# Altium footprint library FootPrintLib_3.PcbLib: 198 footprints (part 4 of 13)
Each footprint in its own frame and in the unit in brackets; x right, y up, seen from the top. Pads: shape width x height; smd on the part's side, far side on the other; paste and mask are expansions set on the pad; w line width, h text height; cw(c..) or ccw(c..) is an arc to the next point about the centre after c.
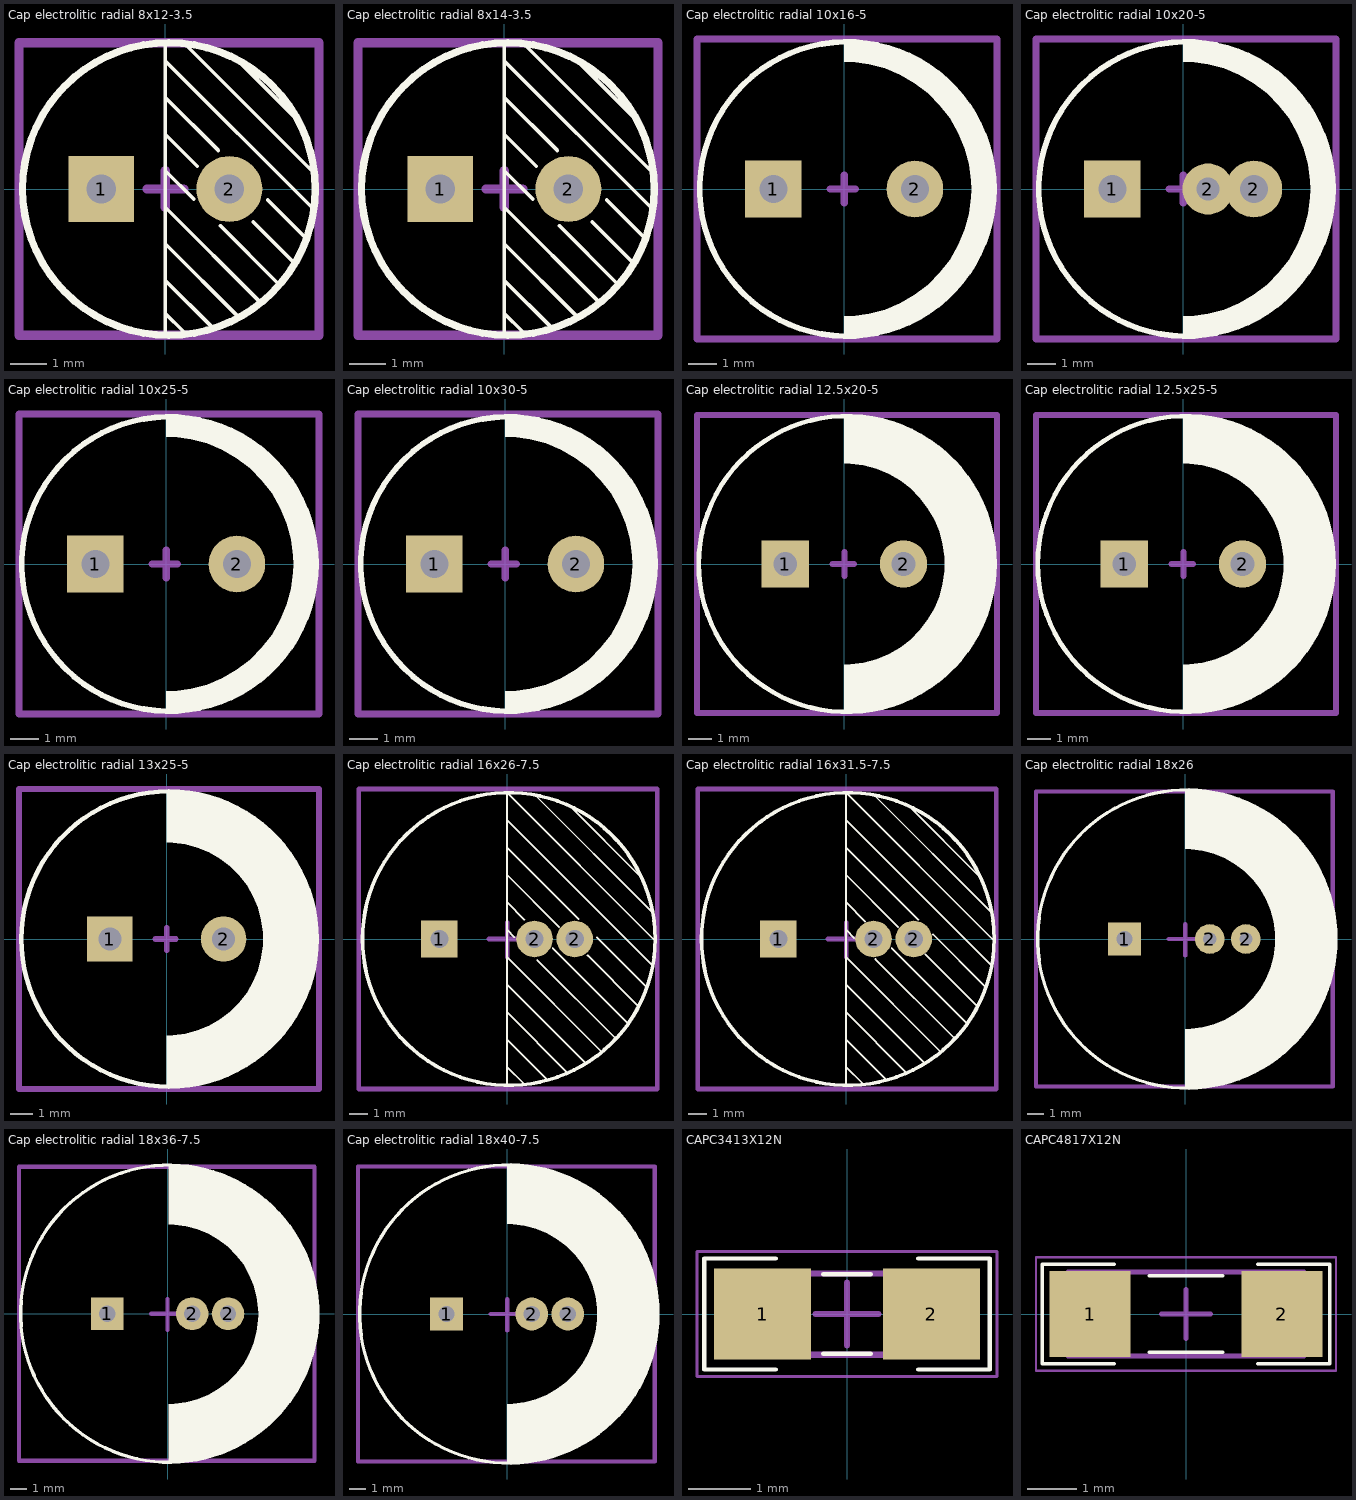
[diagram p3: the footprints below, top view; thin cyan lines are the x and y axes]

## Cap electrolitic radial 8x12-3.5 [mm] "Cap electrolitic radial 8x12-3.5-Design:Abbas Basereh"
height 12
pads (2):
  rect 1.8x1.8 hole 0.8: 1(-1.75,0)
  round 1.8 hole 0.8: 2(1.75,0)
Top Overlay:
  circle w0.2: c0.096,0 r4
  lines w0.1: 0,-4 0,4 ; 0,-3.4 0.5,-3.9 ; 0,-2.5 1.3,-3.8 ; 0,-1.5 2,-3.5 ; 0,-0.5 2.6,-3.1 ; 0,0.5 0.775,-0.275 ; 0,1.5 0.875,0.625 ; 0,2.5 1.45,1.05 ; 0,3.5 4,-0.5 ; 0.5,4 4,0.5 ; 1.5,-1 3.1,-2.6 ; 2,3.5 3.6,1.9 ; 2.4,-0.9 3.5,-2 ; 2.8,-0.3 3.8,-1.3
Mechanical 15:
  lines w0.254: -0.5,0 0.5,0 ; 0,-0.5 0,0.5 ; -4,-4 4.2,-4 4.2,4 -4,4 -4,-4
3D body "User Library-Cap-EL(8x12-3_5)T.STEP": height 12.3, standoff -3.3, extent -4,-3.998 4.002,3.998

## Cap electrolitic radial 8x14-3.5 [mm] "Cap electrolitic radial 8x14-3.5-Design:Abbas Basereh"
height 14
pads (2):
  rect 1.8x1.8 hole 0.8: 1(-1.75,0)
  round 1.8 hole 0.8: 2(1.75,0)
Top Overlay:
  circle w0.2: c0.096,0 r4
  lines w0.1: 0,-4 0,4 ; 0,-3.4 0.5,-3.9 ; 0,-2.5 1.3,-3.8 ; 0,-1.5 2,-3.5 ; 0,-0.5 2.6,-3.1 ; 0,0.5 0.775,-0.275 ; 0,1.5 0.875,0.625 ; 0,2.5 1.45,1.05 ; 0,3.5 4,-0.5 ; 0.5,4 4,0.5 ; 1.5,-1 3.1,-2.6 ; 2,3.5 3.6,1.9 ; 2.4,-0.9 3.5,-2 ; 2.8,-0.3 3.8,-1.3
Mechanical 15:
  lines w0.254: -0.5,0 0.5,0 ; 0,-0.5 0,0.5 ; -4,-4 4.2,-4 4.2,4 -4,4 -4,-4
3D body "User Library-CAP-EL8X14_R150_D320_H570.STEP": height 14.6, standoff -2.7, extent -4.1,-4.1 4.1,4.1

## Cap electrolitic radial 10x16-5 [mm] "Cap electrolitic radial 10x16-5-Design:Abbas Basereh"
height 16
pads (2):
  rect 2x2 hole 1: 1(-2.5,0)
  round 2 hole 1: 2(2.5,0)
Top Overlay:
  circle w0.2: c0.096,0 r5.2
  region: 0,5.2 0.096,5.2 0.437,5.2 1.113,5.111 1.771,4.935 2.401,4.674 2.991,4.333 3.532,3.918 4.014,3.436 4.429,2.895 4.77,2.305 5.031,1.675 5.207,1.017 5.296,0.341 5.296,0 5.296,-0.341 5.207,-1.017 5.031,-1.675 4.77,-2.305 4.429,-2.895 4.014,-3.436 3.532,-3.918 2.991,-4.333 2.401,-4.674 1.771,-4.935 1.113,-5.111 0.437,-5.2 0.096,-5.2 0,-5.2 0,-4.5 0.294,-4.49 0.878,-4.414 1.446,-4.261 1.99,-4.036 2.5,-3.742 2.967,-3.383 3.383,-2.967 3.742,-2.5 4.036,-1.99 4.261,-1.446 4.414,-0.878 4.49,-0.294 4.5,0 4.49,0.294 4.414,0.878 4.261,1.446 4.036,1.99 3.742,2.5 3.383,2.967 2.967,3.383 2.5,3.742 1.99,4.036 1.446,4.261 0.878,4.414 0.294,4.49 0,4.5
Mechanical 15:
  lines w0.254: -0.5,0 0.4,0 ; 0,-0.5 0,0.5 ; -5.2,-5.3 5.4,-5.3 5.4,5.3 -5.2,5.3 -5.2,-5.3
3D body "User Library-Cap-EL(10x16-5).STEP": height 16, standoff -3.3, extent -5,-4.997 5.002,4.998

## Cap electrolitic radial 10x20-5 [mm] "Cap electrolitic radial 10x20-5-Design:Abbas Basereh"
height 20
pads (3):
  rect 2x2 hole 1: 1(-2.5,0)
  round 1.8 hole 0.8: 2(0.875,0)
  round 2 hole 1: 2(2.5,0)
Top Overlay:
  circle w0.2: c0.096,0 r5.2
  region: 0,5.2 0.096,5.2 0.437,5.2 1.113,5.111 1.771,4.935 2.401,4.674 2.991,4.333 3.532,3.918 4.014,3.436 4.429,2.895 4.77,2.305 5.031,1.675 5.207,1.017 5.296,0.341 5.296,0 5.296,-0.341 5.207,-1.017 5.031,-1.675 4.77,-2.305 4.429,-2.895 4.014,-3.436 3.532,-3.918 2.991,-4.333 2.401,-4.674 1.771,-4.935 1.113,-5.111 0.437,-5.2 0.096,-5.2 0,-5.2 0,-4.5 0.294,-4.49 0.878,-4.414 1.446,-4.261 1.99,-4.036 2.5,-3.742 2.967,-3.383 3.383,-2.967 3.742,-2.5 4.036,-1.99 4.261,-1.446 4.414,-0.878 4.49,-0.294 4.5,0 4.49,0.294 4.414,0.878 4.261,1.446 4.036,1.99 3.742,2.5 3.383,2.967 2.967,3.383 2.5,3.742 1.99,4.036 1.446,4.261 0.878,4.414 0.294,4.49 0,4.5
Mechanical 15:
  lines w0.254: -0.5,0 0.4,0 ; 0,-0.5 0,0.5 ; -5.2,-5.3 -5.2,5.3 5.4,5.3 5.4,-5.3 -5.2,-5.3
3D body "User Library-Cap-EL(10x20-5).STEP": height 20, standoff -3.3, extent -5,-5 5.002,5

## Cap electrolitic radial 10x25-5 [mm] "Cap electrolitic radial 10x25-5-Design:Abbas Basereh"
height 25
pads (2):
  rect 2x2 hole 1: 1(-2.5,0)
  round 2 hole 1: 2(2.5,0)
Top Overlay:
  circle w0.2: c0.096,0 r5.2
  region: 0,5.2 0.096,5.2 0.437,5.2 1.113,5.111 1.771,4.935 2.401,4.674 2.991,4.333 3.532,3.918 4.014,3.436 4.429,2.895 4.77,2.305 5.031,1.675 5.207,1.017 5.296,0.341 5.296,0 5.296,-0.341 5.207,-1.017 5.031,-1.675 4.77,-2.305 4.429,-2.895 4.014,-3.436 3.532,-3.918 2.991,-4.333 2.401,-4.674 1.771,-4.935 1.113,-5.111 0.437,-5.2 0.096,-5.2 0,-5.2 0,-4.5 0.294,-4.49 0.878,-4.414 1.446,-4.261 1.99,-4.036 2.5,-3.742 2.967,-3.383 3.383,-2.967 3.742,-2.5 4.036,-1.99 4.261,-1.446 4.414,-0.878 4.49,-0.294 4.5,0 4.49,0.294 4.414,0.878 4.261,1.446 4.036,1.99 3.742,2.5 3.383,2.967 2.967,3.383 2.5,3.742 1.99,4.036 1.446,4.261 0.878,4.414 0.294,4.49 0,4.5
Mechanical 15:
  lines w0.254: -0.5,0 0.4,0 ; 0,-0.5 0,0.5 ; -5.2,-5.3 5.4,-5.3 5.4,5.3 -5.2,5.3 -5.2,-5.3
3D body "User Library-Cap-EL(10x25-5).STEP": height 25, standoff -3.3, extent -5,-4.998 5.002,4.999

## Cap electrolitic radial 10x30-5 [mm] "Cap electrolitic radial 10x30-5-Design:Abbas Basereh"
height 30
pads (2):
  rect 2x2 hole 1: 1(-2.5,0)
  round 2 hole 1: 2(2.5,0)
Top Overlay:
  circle w0.2: c0.096,0 r5.2
  region: 0,5.2 0.096,5.2 0.437,5.2 1.113,5.111 1.771,4.935 2.401,4.674 2.991,4.333 3.532,3.918 4.014,3.436 4.429,2.895 4.77,2.305 5.031,1.675 5.207,1.017 5.296,0.341 5.296,0 5.296,-0.341 5.207,-1.017 5.031,-1.675 4.77,-2.305 4.429,-2.895 4.014,-3.436 3.532,-3.918 2.991,-4.333 2.401,-4.674 1.771,-4.935 1.113,-5.111 0.437,-5.2 0.096,-5.2 0,-5.2 0,-4.5 0.294,-4.49 0.878,-4.414 1.446,-4.261 1.99,-4.036 2.5,-3.742 2.967,-3.383 3.383,-2.967 3.742,-2.5 4.036,-1.99 4.261,-1.446 4.414,-0.878 4.49,-0.294 4.5,0 4.49,0.294 4.414,0.878 4.261,1.446 4.036,1.99 3.742,2.5 3.383,2.967 2.967,3.383 2.5,3.742 1.99,4.036 1.446,4.261 0.878,4.414 0.294,4.49 0,4.5
Mechanical 15:
  lines w0.254: -0.5,0 0.4,0 ; 0,-0.5 0,0.5 ; -5.2,-5.3 -5.2,5.3 5.4,5.3 5.4,-5.3 -5.2,-5.3
3D body "User Library-Cap-EL(10x30-5)T.STEP": height 30.5, standoff -3.5, extent -5,-4.997 5.002,4.996

## Cap electrolitic radial 12.5x20-5 [mm] "Cap electrolitic radial 12.5x20-5-Design:Abbas Basereh"
height 20
pads (2):
  rect 2x2 hole 1: 1(-2.5,0)
  round 2 hole 1: 2(2.5,0)
Top Overlay:
  circle w0.2: c0.096,0 r6.25
  region: 0,6.25 0.307,6.25 0.918,6.19 1.52,6.07 2.108,5.892 2.675,5.657 3.217,5.367 3.728,5.026 4.202,4.637 4.637,4.202 5.026,3.728 5.367,3.217 5.657,2.675 5.892,2.108 6.07,1.52 6.19,0.918 6.25,0.307 6.25,0 6.25,-0.307 6.19,-0.918 6.07,-1.52 5.892,-2.108 5.657,-2.675 5.367,-3.217 5.026,-3.728 4.637,-4.202 4.202,-4.637 3.728,-5.026 3.217,-5.367 2.675,-5.657 2.108,-5.892 1.52,-6.07 0.918,-6.19 0.307,-6.25 0,-6.25 0,-4.25 0.278,-4.241 0.829,-4.168 1.366,-4.024 1.88,-3.812 2.361,-3.534 2.802,-3.195 3.195,-2.802 3.534,-2.361 3.812,-1.88 4.024,-1.366 4.168,-0.829 4.241,-0.278 4.25,0 4.241,0.278 4.168,0.829 4.024,1.366 3.812,1.88 3.534,2.361 3.195,2.802 2.802,3.195 2.361,3.534 1.88,3.812 1.366,4.024 0.829,4.168 0.278,4.241 0,4.25
Mechanical 15:
  lines w0.254: -0.5,0 0.4,0 ; 0,-0.5 0,0.5 ; -6.225,-6.3 6.45,-6.3 6.45,6.3 -6.225,6.3 -6.225,-6.3
3D body "User Library-Cap-EL(12_5x20-5)T.STEP": height 20.7, standoff -3.3, extent -6.25,-6.25 6.252,6.25

## Cap electrolitic radial 12.5x25-5 [mm] "Cap electrolitic radial 12.5x25-5-Design:Abbas Basereh"
height 25
pads (2):
  rect 2x2 hole 1: 1(-2.5,0)
  round 2 hole 1: 2(2.5,0)
Top Overlay:
  circle w0.2: c0.096,0 r6.25
  region: 0,6.25 0.307,6.25 0.918,6.19 1.52,6.07 2.108,5.892 2.675,5.657 3.217,5.367 3.728,5.026 4.202,4.637 4.637,4.202 5.026,3.728 5.367,3.217 5.657,2.675 5.892,2.108 6.07,1.52 6.19,0.918 6.25,0.307 6.25,0 6.25,-0.307 6.19,-0.918 6.07,-1.52 5.892,-2.108 5.657,-2.675 5.367,-3.217 5.026,-3.728 4.637,-4.202 4.202,-4.637 3.728,-5.026 3.217,-5.367 2.675,-5.657 2.108,-5.892 1.52,-6.07 0.918,-6.19 0.307,-6.25 0,-6.25 0,-4.25 0.278,-4.241 0.829,-4.168 1.366,-4.024 1.88,-3.812 2.361,-3.534 2.802,-3.195 3.195,-2.802 3.534,-2.361 3.812,-1.88 4.024,-1.366 4.168,-0.829 4.241,-0.278 4.25,0 4.241,0.278 4.168,0.829 4.024,1.366 3.812,1.88 3.534,2.361 3.195,2.802 2.802,3.195 2.361,3.534 1.88,3.812 1.366,4.024 0.829,4.168 0.278,4.241 0,4.25
Mechanical 15:
  lines w0.254: -0.5,0 0.4,0 ; 0,-0.5 0,0.5 ; -6.225,-6.3 -6.225,6.3 6.45,6.3 6.45,-6.3 -6.225,-6.3
3D body "User Library-Cap-EL(12_5x25-5)T.STEP": height 25.7, standoff -3.3, extent -6.25,-6.25 6.252,6.25

## Cap electrolitic radial 13x25-5 [mm] "Cap electrolitic radial 13x25-5-Design:Abbas Basereh"
height 25
pads (2):
  rect 2x2 hole 1: 1(-2.5,0)
  round 2 hole 1: 2(2.5,0)
Top Overlay:
  circle w0.2: c0.096,0 r6.5
  region: 0,6.5 0.096,6.5 0.415,6.5 1.051,6.437 1.677,6.313 2.288,6.127 2.878,5.883 3.442,5.582 3.973,5.227 4.466,4.822 4.918,4.37 5.323,3.877 5.678,3.346 5.979,2.782 6.223,2.192 6.409,1.581 6.533,0.955 6.596,0.319 6.596,0 6.596,-0.319 6.533,-0.955 6.409,-1.581 6.223,-2.192 5.979,-2.782 5.678,-3.346 5.323,-3.877 4.918,-4.37 4.466,-4.822 3.973,-5.227 3.442,-5.582 2.878,-5.883 2.288,-6.127 1.677,-6.313 1.051,-6.437 0.415,-6.5 0.096,-6.5 0,-6.5 0,-4.25 0.278,-4.241 0.829,-4.168 1.366,-4.024 1.88,-3.812 2.361,-3.534 2.802,-3.195 3.195,-2.802 3.534,-2.361 3.812,-1.88 4.024,-1.366 4.168,-0.829 4.241,-0.278 4.25,0 4.241,0.278 4.168,0.829 4.024,1.366 3.812,1.88 3.534,2.361 3.195,2.802 2.802,3.195 2.361,3.534 1.88,3.812 1.366,4.024 0.829,4.168 0.278,4.241 0,4.25
Mechanical 15:
  lines w0.254: -0.5,0 0.4,0 ; 0,-0.5 0,0.5 ; -6.5,-6.6 -6.5,6.6 6.7,6.6 6.7,-6.6 -6.5,-6.6
3D body "User Library-Cap-EL(13x25-5).STEP": height 25.2, standoff -3.1, extent -6.5,-6.499 6.502,6.499

## Cap electrolitic radial 16x26-7.5 [mm] "Cap electrolitic radial 16x26-7.5-Design:Abbas Basereh"
height 26
pads (3):
  rect 2x2 hole 1: 1(-3.7,0)
  round 2 hole 1: 2(1.5,0) 2(3.7,0)
Top Overlay:
  circle w0.2: c0.096,0 r8
  lines w0.1: 0,-8 0,8 8,0 ; 0,-7 0.9,-7.9 ; 0,-5.5 2.2,-7.7 ; 0,-4 3.3,-7.3 ; 0,-2.5 4.3,-6.8 ; 0,-1 5.15,-6.15 ; 0,0.5 0.4,0.1 ; 0,2 0.95,1.05 ; 0,3.5 2.85,0.65 ; 0,5 3.9,1.1 ; 0,6.5 7.9,-1.4 ; 1.5,7.9 7.9,1.5 ; 1.65,-1.15 5.9,-5.4 ; 2.5,-0.5 6.6,-4.6 ; 3.5,7.2 7.2,3.5 ; 4.4,-0.9 7.2,-3.7 ; 4.9,0.1 7.6,-2.6 ; 0.9,-7.9 0.9,-7.9
Mechanical 15:
  lines w0.254: -1,0 1,0 ; 0,-1 0,0.9 ; -8.1,-8.2 8.2,-8.2 8.2,8.2 -8.1,8.2 -8.1,-8.2
3D body "User Library-Cap-EL(16x26-7_5).STEP": height 26.2, standoff -4.1, extent -8,-7.997 8.002,7.997

## Cap electrolitic radial 16x31.5-7.5 [mm] "Cap electrolitic radial 16x31.5-7.5-Design:Abbas Basereh"
height 31.5
pads (3):
  rect 2x2 hole 1: 1(-3.7,0)
  round 2 hole 1: 2(1.5,0) 2(3.7,0)
Top Overlay:
  circle w0.2: c0.096,0 r8
  lines w0.1: 0,-8 0,8 8,0 ; 0,-7 0.9,-7.9 ; 0,-5.5 2.2,-7.7 ; 0,-4 3.3,-7.3 ; 0,-2.5 4.3,-6.8 ; 0,-1 5.15,-6.15 ; 0,0.5 0.45,0.05 ; 0,2 1.05,0.95 ; 0,3.5 2.85,0.65 ; 0,5 3.95,1.05 ; 0,6.5 7.9,-1.4 ; 1.5,7.9 7.9,1.5 ; 1.6,-1.1 5.9,-5.4 ; 2.5,-0.5 6.6,-4.6 ; 3.5,7.2 7.2,3.5 ; 4.35,-0.85 7.2,-3.7 ; 4.75,0.25 7.6,-2.6 ; 0.9,-7.9 0.9,-7.9
Mechanical 15:
  lines w0.254: -1,0 1,0 ; 0,-1 0,0.9 ; -8.1,-8.2 8.2,-8.2 8.2,8.2 -8.1,8.2 -8.1,-8.2
3D body "User Library-Cap-EL(16x31_5-7_5)T.STEP": height 41.2, standoff -2.8, extent -8,-8 8.002,8

## Cap electrolitic radial 18x26 [mm] "Cap electrolitic radial 18x26-Design:Abbas Basereh"
height 26
pads (3):
  rect 2x2 hole 1: 1(-3.7,0)
  round 1.8 hole 0.8: 2(1.5,0) 2(3.7,0)
Top Overlay:
  circle w0.2: c0.096,0 r9.1
  region: 0,9.1 0.096,9.1 0.543,9.1 1.433,9.012 2.31,8.838 3.165,8.578 3.991,8.236 4.78,7.815 5.523,7.318 6.215,6.751 6.847,6.119 7.414,5.427 7.911,4.684 8.332,3.895 8.674,3.069 8.934,2.214 9.108,1.337 9.196,0.447 9.196,0 9.196,-0.447 9.108,-1.337 8.934,-2.214 8.674,-3.069 8.332,-3.895 7.911,-4.684 7.414,-5.427 6.847,-6.119 6.215,-6.751 5.523,-7.318 4.78,-7.815 3.991,-8.236 3.165,-8.578 2.31,-8.838 1.433,-9.012 0.543,-9.1 0.096,-9.1 0,-9.1 0,-5.5 0.36,-5.488 1.073,-5.394 1.768,-5.208 2.433,-4.933 3.056,-4.573 3.626,-4.135 4.135,-3.626 4.573,-3.056 4.933,-2.433 5.208,-1.768 5.394,-1.073 5.488,-0.36 5.5,0 5.488,0.36 5.394,1.073 5.208,1.768 4.933,2.433 4.573,3.056 4.135,3.626 3.626,4.135 3.056,4.573 2.433,4.933 1.768,5.208 1.073,5.394 0.36,5.488 0,5.5
Mechanical 15:
  lines w0.254: -1,0 1,0 ; 0,-1 0,0.9 ; -9.1,-9 -9.1,9 9,9 9,-9 -9.1,-9
3D body "User Library-Cap-EL(18x26-7_5)T.STEP": height 27, standoff -3, extent -9,-8.999 9.002,8.999

## Cap electrolitic radial 18x36-7.5 [mm] "Cap electrolitic radial 18x36-7.5-Design:Abbas Basereh"
height 36
pads (3):
  rect 2x2 hole 1: 1(-3.7,0)
  round 2 hole 1: 2(1.5,0) 2(3.7,0)
Top Overlay:
  circle w0.2: c0.096,0 r9.1
  region: 0.074,9.065 0.17,9.065 0.617,9.065 1.506,8.977 2.383,8.803 3.239,8.543 4.065,8.201 4.854,7.78 5.597,7.283 6.288,6.716 6.92,6.083 7.488,5.392 7.984,4.649 8.406,3.86 8.748,3.034 9.008,2.179 9.182,1.302 9.27,0.412 9.27,-0.035 9.27,-0.482 9.182,-1.372 9.008,-2.249 8.748,-3.105 8.406,-3.931 7.984,-4.719 7.488,-5.463 6.92,-6.154 6.288,-6.786 5.597,-7.353 4.854,-7.85 4.065,-8.271 3.239,-8.614 2.383,-8.873 1.506,-9.047 0.617,-9.135 0.17,-9.135 0.074,-9.135 0.074,-5.535 0.433,-5.523 1.147,-5.429 1.842,-5.243 2.506,-4.968 3.129,-4.608 3.7,-4.17 4.209,-3.662 4.647,-3.091 5.006,-2.468 5.282,-1.803 5.468,-1.108 5.562,-0.395 5.574,-0.035 5.562,0.325 5.468,1.038 5.282,1.733 5.006,2.397 4.647,3.021 4.209,3.591 3.7,4.1 3.129,4.538 2.506,4.898 1.842,5.173 1.147,5.359 0.433,5.453 0.074,5.465
Mechanical 15:
  lines w0.254: -1,0 1,0 ; 0,-1 0,0.9 ; -9.1,-9 -9.1,9 9,9 9,-9 -9.1,-9
3D body "User Library-Cap-EL(18x36-7_5)T.STEP": height 37, standoff -3, extent -9,-9 9.002,9

## Cap electrolitic radial 18x40-7.5 [mm] "Cap electrolitic radial 18x40-7.5-Design:Abbas Basereh"
height 40
pads (3):
  rect 2x2 hole 1: 1(-3.7,0)
  round 2 hole 1: 2(1.5,0) 2(3.7,0)
Top Overlay:
  circle w0.2: c0.096,0 r9.1
  region: 0.004,9.1 0.1,9.1 0.547,9.1 1.437,9.012 2.314,8.838 3.169,8.578 3.995,8.236 4.784,7.815 5.527,7.318 6.219,6.751 6.851,6.119 7.418,5.427 7.915,4.684 8.336,3.895 8.678,3.069 8.938,2.214 9.112,1.337 9.2,0.447 9.2,0 9.2,-0.447 9.112,-1.337 8.938,-2.214 8.678,-3.069 8.336,-3.895 7.915,-4.684 7.418,-5.427 6.851,-6.119 6.219,-6.751 5.527,-7.318 4.784,-7.815 3.995,-8.236 3.169,-8.578 2.314,-8.838 1.437,-9.012 0.547,-9.1 0.1,-9.1 0.004,-9.1 0.004,-5.5 0.364,-5.488 1.077,-5.394 1.772,-5.208 2.437,-4.933 3.06,-4.573 3.63,-4.135 4.139,-3.626 4.577,-3.056 4.937,-2.433 5.212,-1.768 5.398,-1.073 5.492,-0.36 5.504,0 5.492,0.36 5.398,1.073 5.212,1.768 4.937,2.433 4.577,3.056 4.139,3.626 3.63,4.135 3.06,4.573 2.437,4.933 1.772,5.208 1.077,5.394 0.364,5.488 0.004,5.5
Mechanical 15:
  lines w0.254: -1,0 1,0 ; 0,-1 0,0.9 ; -9.1,-9 -9.1,9 9,9 9,-9 -9.1,-9
3D body "User Library-Cap-EL(18x40-7_5)T.STEP": height 41, standoff -3, extent -9,-8.999 9.002,9

## CAPC3413X12N [mm] "Chip Capacitor, 2-Leads, Body 3/40x1/30mm, IPC Medium Density-Design:Abbas Basereh"
height 1.2
pads (2):
  rect 1.55x1.45 smd: 1(-1.35,0) 2(1.35,0)
Top Overlay:
  lines w0.07: -1.143,-0.889 -2.286,-0.889 -2.286,0.889 -1.143,0.889 ; -0.381,-0.635 0.381,-0.635 ; -0.381,0.635 0.381,0.635 ; 1.143,-0.889 2.286,-0.889 2.286,0.889 1.143,0.889
Mechanical 13:
  lines w0.1: -1.7,-0.65 1.7,-0.65 1.7,0.65 -1.7,0.65 -1.7,-0.65
Mechanical 15:
  lines w0.05: -2.4,-1 2.4,-1 2.4,1 -2.4,1 -2.4,-1
  lines w0.1: -0.5,0 0.5,0 ; 0,-0.5 0,0.5
3D body "SW3dPS-0805 SMD Capacitor.STEP": height 0.78, standoff 0, extent -1,-0.625 1,0.625

## CAPC4817X12N [mm] "Chip Capacitor, 2-Leads, Body 4/80x1/70mm, IPC Medium Density-Design:Abbas Basereh"
height 1.2
pads (2):
  rect 1.65x1.75 smd: 1(-1.95,0) 2(1.95,0)
Top Overlay:
  lines w0.07: -1.46,-1.016 -2.921,-1.016 -2.921,1.016 -1.46,1.016 ; -0.75,-0.775 0.75,-0.775 ; -0.75,0.775 0.75,0.775 ; 1.46,-1.016 2.921,-1.016 2.921,1.016 1.46,1.016
Mechanical 13:
  lines w0.1: -2.4,-0.85 -2.4,0.85 2.4,0.85 2.4,-0.85 -2.4,-0.85
Mechanical 15:
  lines w0.05: -3.05,-1.15 -3.05,1.15 3.05,1.15 3.05,-1.15 -3.05,-1.15
  lines w0.1: -0.5,0 0.5,0 ; 0,-0.5 0,0.5
3D body "SW3dPS-1206 SMD Capacitor.STEP": height 1, standoff 0, extent -1.6,-0.8 1.6,0.8